# Altium footprint library 0805CA101KAT2A.PcbLib: 1 footprints
Each footprint in its own frame and in the unit in brackets; x right, y up, seen from the top. Pads: shape width x height; smd on the part's side, far side on the other; paste and mask are expansions set on the pad; w line width, h text height; cw(c..) or ccw(c..) is an arc to the next point about the centre after c.
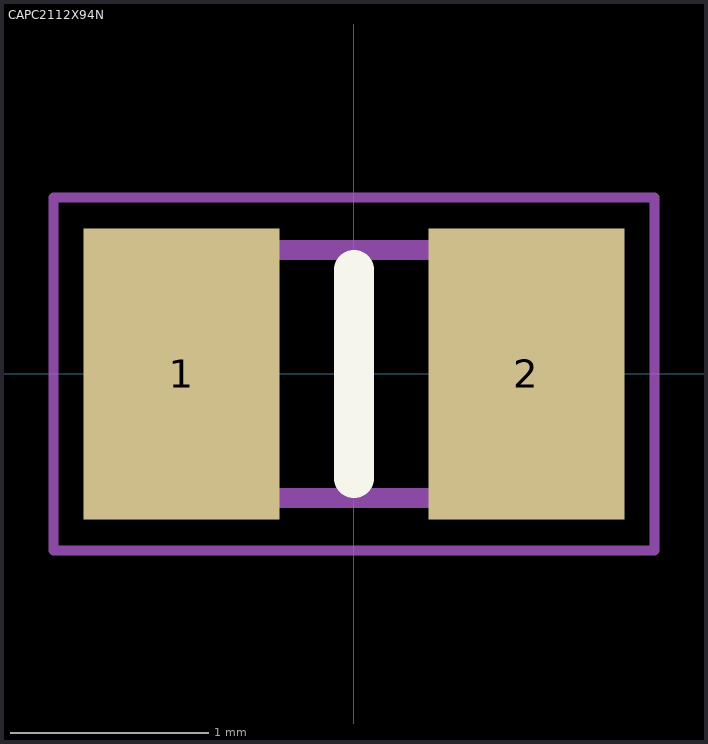
[diagram p0: the footprint, top view; thin cyan lines are the x and y axes]

## CAPC2112X94N [mm]
pads (2):
  rect 0.99x1.47 smd: 1(-0.87,0) 2(0.87,0)
Top Overlay:
  lines w0.2: 0,-0.525 0,0.525
Mechanical 15:
  lines w0.1: -1.05,-0.625 -1.05,0.625 1.05,0.625 1.05,-0.625 -1.05,-0.625
Mechanical 20:
  lines w0.05: -1.515,-0.89 -1.515,0.89 1.515,0.89 1.515,-0.89 -1.515,-0.89
3D body "0805CA101KAT2A.stp": height 0.94, standoff 0, extent -1.05,-0.625 1.05,0.625